# Altium footprint library WR-FPC_0.50mm.PcbLib: 147 footprints (part 5 of 10)
Each footprint in its own frame and in the unit in brackets; x right, y up, seen from the top. Pads: shape width x height; smd on the part's side, far side on the other; paste and mask are expansions set on the pad; w line width, h text height; cw(c..) or ccw(c..) is an arc to the next point about the centre after c.
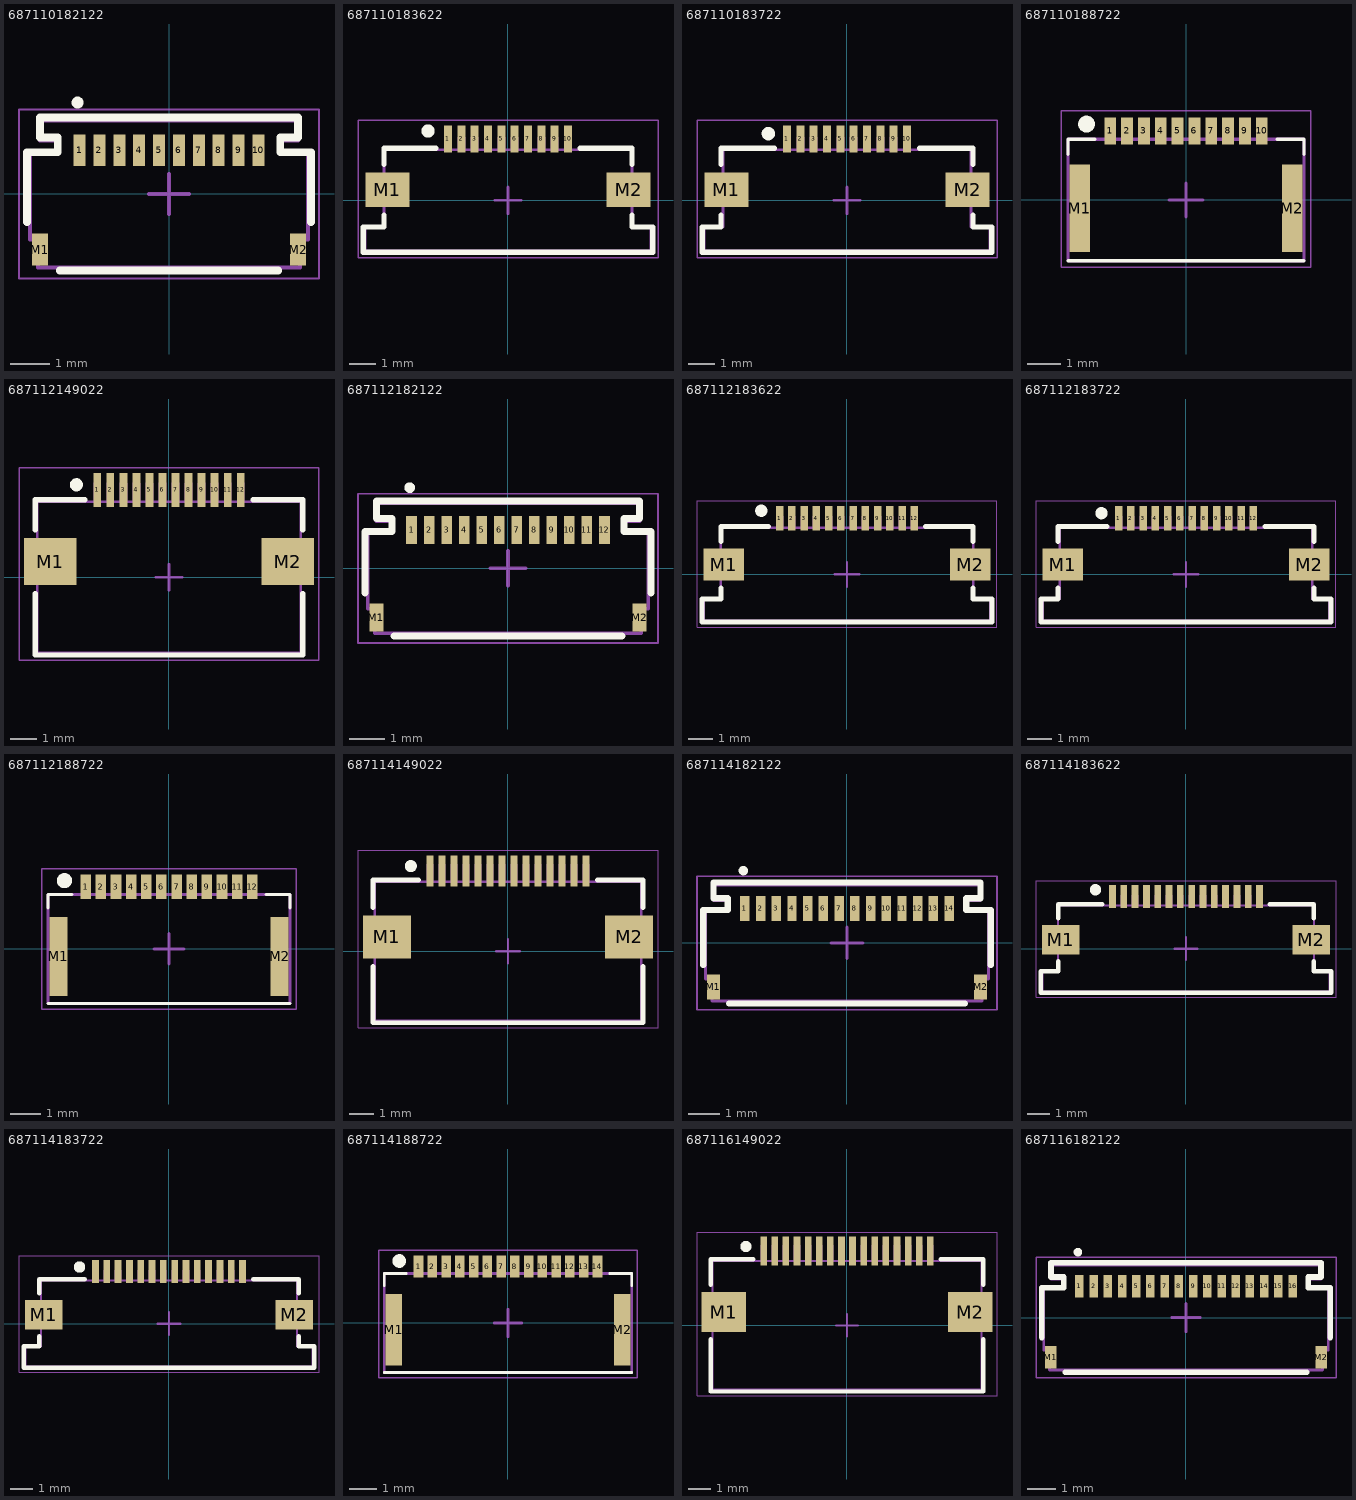
[diagram p4: the footprints below, top view; thin cyan lines are the x and y axes]

## 687110182122 [mm] "ZIF Connectors, Horizontal, Dual Contact Back Locking, pitch 0.5mm, 10p"
height 1.06
pads (12):
  rect 0.3x0.8 smd: 1(-2.25,1.1) 2(-1.75,1.1) 3(-1.25,1.1) 4(-0.75,1.1) 5(-0.25,1.1) 6(0.25,1.1) 7(0.75,1.1) 8(1.25,1.1) 9(1.75,1.1) 10(2.25,1.1)
  rect 0.4x0.8 smd: M1(-3.25,-1.4) M2(3.25,-1.4)
Top Overlay:
  circle w0.15: c-2.3,2.3 r0.075
  lines w0.2: -3.575,-0.7 -3.575,1.05 -2.8,1.05 -2.8,1.425 -3.25,1.425 -3.25,1.925 3.25,1.925 3.25,1.425 2.8,1.425 2.8,1.05 3.575,1.05 3.575,-0.7 ; -2.75,-1.925 2.75,-1.925
Top Assembly:
  lines w0.1: -3.5,-1.15 -3.3,-1.15 -3.3,-1.85 3.3,-1.85 3.3,-1.15 3.5,-1.15 3.5,1.05 2.8,1.05 2.8,1.35 3.25,1.35 3.25,1.85 -3.25,1.85 -3.25,1.35 -2.8,1.35 -2.8,1.05 -3.5,1.05 -3.5,-1.15
Top Designator:
  text ".Designator" at -3.647,-0.357 h1
Top 3D Body:
  lines w0.1: -3.5,-1.15 -3.5,1.05 -2.8,1.05 -2.8,1.35 -3.25,1.35 -3.25,1.85 3.25,1.85 3.25,1.35 2.8,1.35 2.8,1.05 3.5,1.05 3.5,-1.15 3.3,-1.15 3.3,-1.85 -3.3,-1.85 -3.3,-1.15 -3.5,-1.15
Top Courtyard:
  lines w0.05: -3.775,-2.125 3.775,-2.125 3.775,2.125 -3.775,2.125 -3.775,-2.125
Top Component Center:
  lines w0.1: -0.5,0 0.5,0 ; 0,-0.5 0,0.5
3D body "687110182122.stp": height 0.98, standoff -0.01, extent -3.5,-1.85 3.5,1.85

## 687110183622 [mm] "ZIF Connectors, Horizontal, Top Contact Low Profile, pitch 0.5mm, 10p"
height 1.3
pads (12):
  rect 0.3x1 smd: 1(-2.25,2.3) 2(-1.75,2.3) 3(-1.25,2.3) 4(-0.75,2.3) 5(-0.25,2.3) 6(0.25,2.3) 7(0.75,2.3) 8(1.25,2.3) 9(1.75,2.3) 10(2.25,2.3)
  rect 1.65x1.3 smd: M1(-4.525,0.4) M2(4.525,0.4)
Top Overlay:
  circle w0.25: c-3,2.6 r0.125
  lines w0.2: -4.65,-0.55 -4.65,-1 -5.425,-1 -5.425,-1.95 5.425,-1.95 5.425,-1 4.65,-1 4.65,-0.55 ; -4.65,1.35 -4.65,1.95 -2.7,1.95 ; 2.7,1.95 4.65,1.95 4.65,1.35
Top Assembly:
  lines w0.1: -2.35,1.9 -2.35,2.35 -2.15,2.35 -2.15,1.9 ; -1.85,1.9 -1.85,2.35 -1.65,2.35 -1.65,1.9 ; -1.35,1.9 -1.35,2.35 -1.15,2.35 -1.15,1.9 ; -0.85,1.9 -0.85,2.35 -0.65,2.35 -0.65,1.9 ; -0.35,1.9 -0.35,2.35 -0.15,2.35 -0.15,1.9 ; 0.15,1.9 0.15,2.35 0.35,2.35 0.35,1.9 ; 0.65,1.9 0.65,2.35 0.85,2.35 0.85,1.9 ; 1.15,1.9 1.15,2.35 1.35,2.35 1.35,1.9 ; 1.65,1.9 1.65,2.35 1.85,2.35 1.85,1.9 ; 2.15,1.9 2.15,2.35 2.35,2.35 2.35,1.9 ; -5.35,-1.9 -5.35,-1 -4.65,-1 -4.65,1.9 4.65,1.9 4.65,-1 5.35,-1 5.35,-1.9 -5.35,-1.9
Top Designator:
  text ".Designator" at -3.647,-0.357 h1
Top 3D Body:
  lines w0.1: -2.35,1.9 -2.35,2.35 -2.15,2.35 -2.15,1.9 ; -1.85,1.9 -1.85,2.35 -1.65,2.35 -1.65,1.9 ; -1.35,1.9 -1.35,2.35 -1.15,2.35 -1.15,1.9 ; -0.85,1.9 -0.85,2.35 -0.65,2.35 -0.65,1.9 ; -0.35,1.9 -0.35,2.35 -0.15,2.35 -0.15,1.9 ; 0.15,1.9 0.15,2.35 0.35,2.35 0.35,1.9 ; 0.65,1.9 0.65,2.35 0.85,2.35 0.85,1.9 ; 1.15,1.9 1.15,2.35 1.35,2.35 1.35,1.9 ; 1.65,1.9 1.65,2.35 1.85,2.35 1.85,1.9 ; 2.15,1.9 2.15,2.35 2.35,2.35 2.35,1.9 ; -5.35,-1.9 5.35,-1.9 5.35,-1 4.65,-1 4.65,1.9 -4.65,1.9 -4.65,-1 -5.35,-1 -5.35,-1.9
Top Courtyard:
  lines w0.05: -5.625,-2.15 -5.625,3 5.625,3 5.625,-2.15 -5.625,-2.15
Top Component Center:
  lines w0.1: -0.5,0 0.5,0 ; 0,-0.5 0,0.5
3D body "687110183622.stp": height 1.28, standoff -0.01, extent -5.35,-1.9 5.35,2.35

## 687110183722 [mm] "ZIF Connectors, Horizontal, Bottom Contact Low Profile, pitch 0.5mm, 10p"
height 1.3
pads (12):
  rect 0.3x1 smd: 1(-2.25,2.3) 2(-1.75,2.3) 3(-1.25,2.3) 4(-0.75,2.3) 5(-0.25,2.3) 6(0.25,2.3) 7(0.75,2.3) 8(1.25,2.3) 9(1.75,2.3) 10(2.25,2.3)
  rect 1.65x1.3 smd: M1(-4.525,0.4) M2(4.525,0.4)
Top Overlay:
  circle w0.25: c-2.95,2.5 r0.125
  lines w0.2: -4.725,-0.55 -4.725,-1 -5.425,-1 -5.425,-1.95 5.425,-1.95 5.425,-1 4.725,-1 4.725,-0.55 ; -4.725,1.35 -4.725,1.95 -2.725,1.95 ; 2.725,1.95 4.725,1.95 4.725,1.35
Top Assembly:
  lines w0.1: -2.35,1.9 -2.35,2.35 -2.15,2.35 -2.15,1.9 ; -1.85,1.9 -1.85,2.35 -1.65,2.35 -1.65,1.9 ; -1.35,1.9 -1.35,2.35 -1.15,2.35 -1.15,1.9 ; -0.85,1.9 -0.85,2.35 -0.65,2.35 -0.65,1.9 ; -0.35,1.9 -0.35,2.35 -0.15,2.35 -0.15,1.9 ; 0.15,1.9 0.15,2.35 0.35,2.35 0.35,1.9 ; 0.65,1.9 0.65,2.35 0.85,2.35 0.85,1.9 ; 1.15,1.9 1.15,2.35 1.35,2.35 1.35,1.9 ; 1.65,1.9 1.65,2.35 1.85,2.35 1.85,1.9 ; 2.15,1.9 2.15,2.35 2.35,2.35 2.35,1.9 ; -5.35,-1.9 -5.35,-1 -4.65,-1 -4.65,1.9 4.65,1.9 4.65,-1 5.35,-1 5.35,-1.9 -5.35,-1.9
Top Designator:
  text ".Designator" at -3.647,-0.357 h1
Top 3D Body:
  lines w0.1: -2.35,1.9 -2.35,2.35 -2.15,2.35 -2.15,1.9 ; -1.85,1.9 -1.85,2.35 -1.65,2.35 -1.65,1.9 ; -1.35,1.9 -1.35,2.35 -1.15,2.35 -1.15,1.9 ; -0.85,1.9 -0.85,2.35 -0.65,2.35 -0.65,1.9 ; -0.35,1.9 -0.35,2.35 -0.15,2.35 -0.15,1.9 ; 0.15,1.9 0.15,2.35 0.35,2.35 0.35,1.9 ; 0.65,1.9 0.65,2.35 0.85,2.35 0.85,1.9 ; 1.15,1.9 1.15,2.35 1.35,2.35 1.35,1.9 ; 1.65,1.9 1.65,2.35 1.85,2.35 1.85,1.9 ; 2.15,1.9 2.15,2.35 2.35,2.35 2.35,1.9 ; -5.35,-1.9 5.35,-1.9 5.35,-1 4.65,-1 4.65,1.9 -4.65,1.9 -4.65,-1 -5.35,-1 -5.35,-1.9
Top Courtyard:
  lines w0.05: -5.625,-2.15 -5.625,3 5.625,3 5.625,-2.15 -5.625,-2.15
Top Component Center:
  lines w0.1: -0.5,0 0.5,0 ; 0,-0.5 0,0.5
3D body "687110183722.stp": height 1.28, standoff -0.01, extent -5.35,-1.9 5.35,2.35

## 687110188722 [mm] "0.5 mm LIF Horizontal FFC Connector, 10pins"
height 1.2
pads (12):
  rect 0.35x0.8 smd: 1(-2.25,2.05) 2(-1.75,2.05) 3(-1.25,2.05) 4(-0.75,2.05) 5(-0.25,2.05) 6(0.25,2.05) 7(0.75,2.05) 8(1.25,2.05) 9(1.75,2.05) 10(2.25,2.05)
  rect 0.6x2.6 smd: M1(-3.15,-0.25) M2(3.15,-0.25)
Top Overlay:
  circle w0.25: c-2.95,2.25 r0.125
  lines w0.1: -3.5,-1.8 3.5,-1.8 ; -3.5,1.35 -3.5,1.8 -2.7,1.8 ; 2.7,1.8 3.5,1.8 3.5,1.35
Top Assembly:
  lines w0.1: -2.35,1.8 -2.35,2.3 -2.15,2.3 -2.15,1.8 ; -1.85,1.8 -1.85,2.3 -1.65,2.3 -1.65,1.8 ; -1.35,1.8 -1.35,2.3 -1.15,2.3 -1.15,1.8 ; -0.85,1.8 -0.85,2.3 -0.65,2.3 -0.65,1.8 ; -0.35,1.8 -0.35,2.3 -0.15,2.3 -0.15,1.8 ; 0.15,1.8 0.15,2.3 0.35,2.3 0.35,1.8 ; 0.65,1.8 0.65,2.3 0.85,2.3 0.85,1.8 ; 1.15,1.8 1.15,2.3 1.35,2.3 1.35,1.8 ; 1.65,1.8 1.65,2.3 1.85,2.3 1.85,1.8 ; 2.15,1.8 2.15,2.3 2.35,2.3 2.35,1.8 ; -3.5,-1.8 -3.5,1.8 3.5,1.8 3.5,-1.8 -3.5,-1.8
Top Designator:
  text ".Designator" at -3.647,-0.357 h1
Top 3D Body:
  lines w0.1: -2.35,1.8 -2.35,2.3 -2.15,2.3 -2.15,1.8 ; -1.85,1.8 -1.85,2.3 -1.65,2.3 -1.65,1.8 ; -1.35,1.8 -1.35,2.3 -1.15,2.3 -1.15,1.8 ; -0.85,1.8 -0.85,2.3 -0.65,2.3 -0.65,1.8 ; -0.35,1.8 -0.35,2.3 -0.15,2.3 -0.15,1.8 ; 0.15,1.8 0.15,2.3 0.35,2.3 0.35,1.8 ; 0.65,1.8 0.65,2.3 0.85,2.3 0.85,1.8 ; 1.15,1.8 1.15,2.3 1.35,2.3 1.35,1.8 ; 1.65,1.8 1.65,2.3 1.85,2.3 1.85,1.8 ; 2.15,1.8 2.15,2.3 2.35,2.3 2.35,1.8 ; -3.5,-1.8 3.5,-1.8 3.5,1.8 -3.5,1.8 -3.5,-1.8
Top Courtyard:
  lines w0.05: -3.7,-2 -3.7,2.65 3.7,2.65 3.7,-2 -3.7,-2
Top Component Center:
  lines w0.1: -0.5,0 0.5,0 ; 0,-0.5 0,0.5
3D body "687110188722.stp": height 1.2, standoff 0, extent -3.5,-1.8 3.5,2.3

## 687112149022 [mm] "0.50mm SMT ZIF Horizontal Hinge Type Bottom Contact, 12p"
height 2.3
pads (14):
  rect 0.3x1.3 smd: 1(-2.75,3.35) 2(-2.25,3.35) 3(-1.75,3.35) 4(-1.25,3.35) 5(-0.75,3.35) 6(-0.25,3.35) 7(0.25,3.35) 8(0.75,3.35) 9(1.25,3.35) 10(1.75,3.35) 11(2.25,3.35) 12(2.75,3.35)
  rect 2x1.8 smd: M1(-4.55,0.6) M2(4.55,0.6)
Top Overlay:
  circle w0.25: c-3.55,3.55 r0.125
  lines w0.2: -5.125,-0.625 -5.125,-2.975 5.125,-2.975 5.125,-0.625 ; -5.125,1.825 -5.125,2.975 -3.225,2.975 ; 3.225,2.975 5.125,2.975 5.125,1.825
Top Assembly:
  lines w0.1: -2.85,2.9 -2.85,3.6 -2.65,3.6 -2.65,2.9 ; -2.35,2.9 -2.35,3.6 -2.15,3.6 -2.15,2.9 ; -1.85,2.9 -1.85,3.6 -1.65,3.6 -1.65,2.9 ; -1.35,2.9 -1.35,3.6 -1.15,3.6 -1.15,2.9 ; -0.85,2.9 -0.85,3.6 -0.65,3.6 -0.65,2.9 ; -0.35,2.9 -0.35,3.6 -0.15,3.6 -0.15,2.9 ; 0.15,2.9 0.15,3.6 0.35,3.6 0.35,2.9 ; 0.65,2.9 0.65,3.6 0.85,3.6 0.85,2.9 ; 1.15,2.9 1.15,3.6 1.35,3.6 1.35,2.9 ; 1.65,2.9 1.65,3.6 1.85,3.6 1.85,2.9 ; 2.15,2.9 2.15,3.6 2.35,3.6 2.35,2.9 ; 2.65,2.9 2.65,3.6 2.85,3.6 2.85,2.9 ; -5.05,-2.9 5.05,-2.9 5.05,2.9 -5.05,2.9 -5.05,-2.9
Top Designator:
  text ".Designator" at -3.647,-0.357 h1
Top 3D Body:
  lines w0.1: -2.85,2.9 -2.85,3.6 -2.65,3.6 -2.65,2.9 ; -2.35,2.9 -2.35,3.6 -2.15,3.6 -2.15,2.9 ; -1.85,2.9 -1.85,3.6 -1.65,3.6 -1.65,2.9 ; -1.35,2.9 -1.35,3.6 -1.15,3.6 -1.15,2.9 ; -0.85,2.9 -0.85,3.6 -0.65,3.6 -0.65,2.9 ; -0.35,2.9 -0.35,3.6 -0.15,3.6 -0.15,2.9 ; 0.15,2.9 0.15,3.6 0.35,3.6 0.35,2.9 ; 0.65,2.9 0.65,3.6 0.85,3.6 0.85,2.9 ; 1.15,2.9 1.15,3.6 1.35,3.6 1.35,2.9 ; 1.65,2.9 1.65,3.6 1.85,3.6 1.85,2.9 ; 2.15,2.9 2.15,3.6 2.35,3.6 2.35,2.9 ; 2.65,2.9 2.65,3.6 2.85,3.6 2.85,2.9 ; -5.05,-2.9 -5.05,2.9 5.05,2.9 5.05,-2.9 -5.05,-2.9
Top Courtyard:
  lines w0.05: -5.75,-3.175 5.75,-3.175 5.75,4.2 -5.75,4.2 -5.75,-3.175
Top Component Center:
  lines w0.1: -0.5,0 0.5,0 ; 0,-0.5 0,0.5
3D body "687112149022.stp": height 2.25, standoff 0, extent -5.05,-2.9 5.05,3.6

## 687112182122 [mm] "ZIF Connectors, Horizontal, Dual Contact Back Locking, pitch 0.5mm, 12p"
height 1.06
pads (14):
  rect 0.3x0.8 smd: 1(-2.75,1.1) 2(-2.25,1.1) 3(-1.75,1.1) 4(-1.25,1.1) 5(-0.75,1.1) 6(-0.25,1.1) 7(0.25,1.1) 8(0.75,1.1) 9(1.25,1.1) 10(1.75,1.1) 11(2.25,1.1) 12(2.75,1.1)
  rect 0.4x0.8 smd: M1(-3.75,-1.4) M2(3.75,-1.4)
Top Overlay:
  circle w0.15: c-2.8,2.3 r0.075
  lines w0.2: -4.075,-0.7 -4.075,1.05 -3.3,1.05 -3.3,1.425 -3.75,1.425 -3.75,1.925 3.75,1.925 3.75,1.425 3.3,1.425 3.3,1.05 4.075,1.05 4.075,-0.7 ; -3.25,-1.925 3.25,-1.925
Top Assembly:
  lines w0.1: -4,-1.15 -4,1.05 -3.3,1.05 -3.3,1.35 -3.75,1.35 -3.75,1.85 3.75,1.85 3.75,1.35 3.3,1.35 3.3,1.05 4,1.05 4,-1.15 3.8,-1.15 3.8,-1.85 -3.8,-1.85 -3.8,-1.15 -4,-1.15
Top Designator:
  text ".Designator" at -3.647,-0.357 h1
Top 3D Body:
  lines w0.1: -4,-1.15 -3.8,-1.15 -3.8,-1.85 3.8,-1.85 3.8,-1.15 4,-1.15 4,1.05 3.3,1.05 3.3,1.35 3.75,1.35 3.75,1.85 -3.75,1.85 -3.75,1.35 -3.3,1.35 -3.3,1.05 -4,1.05 -4,-1.15
Top Courtyard:
  lines w0.05: -4.275,-2.125 -4.275,2.125 4.275,2.125 4.275,-2.125 -4.275,-2.125
Top Component Center:
  lines w0.1: -0.5,0 0.5,0 ; 0,-0.5 0,0.5
3D body "687112182122.stp": height 0.98, standoff -0.01, extent -4,-1.85 4,1.85

## 687112183622 [mm] "ZIF Connectors, Horizontal, Top Contact Low Profile, pitch 0.5mm, 12p"
height 1.3
pads (14):
  rect 0.3x1 smd: 1(-2.75,2.3) 2(-2.25,2.3) 3(-1.75,2.3) 4(-1.25,2.3) 5(-0.75,2.3) 6(-0.25,2.3) 7(0.25,2.3) 8(0.75,2.3) 9(1.25,2.3) 10(1.75,2.3) 11(2.25,2.3) 12(2.75,2.3)
  rect 1.65x1.3 smd: M1(-5.025,0.4) M2(5.025,0.4)
Top Overlay:
  circle w0.25: c-3.5,2.6 r0.125
  lines w0.2: -5.15,-0.55 -5.15,-1 -5.925,-1 -5.925,-1.95 5.925,-1.95 5.925,-1 5.15,-1 5.15,-0.55 ; -5.15,1.35 -5.15,1.95 -3.2,1.95 ; 3.2,1.95 5.15,1.95 5.15,1.35
Top Assembly:
  lines w0.1: -2.85,1.9 -2.85,2.35 -2.65,2.35 -2.65,1.9 ; -2.35,1.9 -2.35,2.35 -2.15,2.35 -2.15,1.9 ; -1.85,1.9 -1.85,2.35 -1.65,2.35 -1.65,1.9 ; -1.35,1.9 -1.35,2.35 -1.15,2.35 -1.15,1.9 ; -0.85,1.9 -0.85,2.35 -0.65,2.35 -0.65,1.9 ; -0.35,1.9 -0.35,2.35 -0.15,2.35 -0.15,1.9 ; 0.15,1.9 0.15,2.35 0.35,2.35 0.35,1.9 ; 0.65,1.9 0.65,2.35 0.85,2.35 0.85,1.9 ; 1.15,1.9 1.15,2.35 1.35,2.35 1.35,1.9 ; 1.65,1.9 1.65,2.35 1.85,2.35 1.85,1.9 ; 2.15,1.9 2.15,2.35 2.35,2.35 2.35,1.9 ; 2.65,1.9 2.65,2.35 2.85,2.35 2.85,1.9 ; -5.85,-1.9 -5.85,-1 -5.15,-1 -5.15,1.9 5.15,1.9 5.15,-1 5.85,-1 5.85,-1.9 -5.85,-1.9
Top Designator:
  text ".Designator" at -3.647,-0.357 h1
Top 3D Body:
  lines w0.1: -2.85,1.9 -2.85,2.35 -2.65,2.35 -2.65,1.9 ; -2.35,1.9 -2.35,2.35 -2.15,2.35 -2.15,1.9 ; -1.85,1.9 -1.85,2.35 -1.65,2.35 -1.65,1.9 ; -1.35,1.9 -1.35,2.35 -1.15,2.35 -1.15,1.9 ; -0.85,1.9 -0.85,2.35 -0.65,2.35 -0.65,1.9 ; -0.35,1.9 -0.35,2.35 -0.15,2.35 -0.15,1.9 ; 0.15,1.9 0.15,2.35 0.35,2.35 0.35,1.9 ; 0.65,1.9 0.65,2.35 0.85,2.35 0.85,1.9 ; 1.15,1.9 1.15,2.35 1.35,2.35 1.35,1.9 ; 1.65,1.9 1.65,2.35 1.85,2.35 1.85,1.9 ; 2.15,1.9 2.15,2.35 2.35,2.35 2.35,1.9 ; 2.65,1.9 2.65,2.35 2.85,2.35 2.85,1.9 ; -5.85,-1.9 5.85,-1.9 5.85,-1 5.15,-1 5.15,1.9 -5.15,1.9 -5.15,-1 -5.85,-1 -5.85,-1.9
Top Courtyard:
  lines w0.05: -6.125,-2.15 -6.125,3 6.125,3 6.125,-2.15 -6.125,-2.15
Top Component Center:
  lines w0.1: -0.5,0 0.5,0 ; 0,-0.5 0,0.5
3D body "687112183622.stp": height 1.28, standoff -0.01, extent -5.85,-1.9 5.85,2.35

## 687112183722 [mm] "ZIF Connectors, Horizontal, Bottom Contact Low Profile, pitch 0.5mm, 12p"
height 1.3
pads (14):
  rect 0.3x1 smd: 1(-2.75,2.3) 2(-2.25,2.3) 3(-1.75,2.3) 4(-1.25,2.3) 5(-0.75,2.3) 6(-0.25,2.3) 7(0.25,2.3) 8(0.75,2.3) 9(1.25,2.3) 10(1.75,2.3) 11(2.25,2.3) 12(2.75,2.3)
  rect 1.65x1.3 smd: M1(-5.025,0.4) M2(5.025,0.4)
Top Overlay:
  circle w0.25: c-3.45,2.5 r0.125
  lines w0.2: -5.225,-0.55 -5.225,-1 -5.925,-1 -5.925,-1.95 5.925,-1.95 5.925,-1 5.225,-1 5.225,-0.55 ; -5.225,1.35 -5.225,1.95 -3.225,1.95 ; 3.225,1.95 5.225,1.95 5.225,1.35
Top Assembly:
  lines w0.1: -2.85,1.9 -2.85,2.35 -2.65,2.35 -2.65,1.9 ; -2.35,1.9 -2.35,2.35 -2.15,2.35 -2.15,1.9 ; -1.85,1.9 -1.85,2.35 -1.65,2.35 -1.65,1.9 ; -1.35,1.9 -1.35,2.35 -1.15,2.35 -1.15,1.9 ; -0.85,1.9 -0.85,2.35 -0.65,2.35 -0.65,1.9 ; -0.35,1.9 -0.35,2.35 -0.15,2.35 -0.15,1.9 ; 0.15,1.9 0.15,2.35 0.35,2.35 0.35,1.9 ; 0.65,1.9 0.65,2.35 0.85,2.35 0.85,1.9 ; 1.15,1.9 1.15,2.35 1.35,2.35 1.35,1.9 ; 1.65,1.9 1.65,2.35 1.85,2.35 1.85,1.9 ; 2.15,1.9 2.15,2.35 2.35,2.35 2.35,1.9 ; 2.65,1.9 2.65,2.35 2.85,2.35 2.85,1.9 ; -5.85,-1.9 5.85,-1.9 5.85,-1 5.15,-1 5.15,1.9 -5.15,1.9 -5.15,-1 -5.85,-1 -5.85,-1.9
Top Designator:
  text ".Designator" at -3.647,-0.357 h1
Top 3D Body:
  lines w0.1: -2.85,1.9 -2.85,2.35 -2.65,2.35 -2.65,1.9 ; -2.35,1.9 -2.35,2.35 -2.15,2.35 -2.15,1.9 ; -1.85,1.9 -1.85,2.35 -1.65,2.35 -1.65,1.9 ; -1.35,1.9 -1.35,2.35 -1.15,2.35 -1.15,1.9 ; -0.85,1.9 -0.85,2.35 -0.65,2.35 -0.65,1.9 ; -0.35,1.9 -0.35,2.35 -0.15,2.35 -0.15,1.9 ; 0.15,1.9 0.15,2.35 0.35,2.35 0.35,1.9 ; 0.65,1.9 0.65,2.35 0.85,2.35 0.85,1.9 ; 1.15,1.9 1.15,2.35 1.35,2.35 1.35,1.9 ; 1.65,1.9 1.65,2.35 1.85,2.35 1.85,1.9 ; 2.15,1.9 2.15,2.35 2.35,2.35 2.35,1.9 ; 2.65,1.9 2.65,2.35 2.85,2.35 2.85,1.9 ; -5.85,-1.9 -5.85,-1 -5.15,-1 -5.15,1.9 5.15,1.9 5.15,-1 5.85,-1 5.85,-1.9 -5.85,-1.9
Top Courtyard:
  lines w0.05: -6.125,-2.15 6.125,-2.15 6.125,3 -6.125,3 -6.125,-2.15
Top Component Center:
  lines w0.1: -0.5,0 0.5,0 ; 0,-0.5 0,0.5
3D body "687112183722.stp": height 1.28, standoff -0.01, extent -5.85,-1.9 5.85,2.35

## 687112188722 [mm] "0.5 mm LIF Horizontal FFC Connector, 12pins"
height 1.2
pads (14):
  rect 0.35x0.8 smd: 1(-2.75,2.05) 2(-2.25,2.05) 3(-1.75,2.05) 4(-1.25,2.05) 5(-0.75,2.05) 6(-0.25,2.05) 7(0.25,2.05) 8(0.75,2.05) 9(1.25,2.05) 10(1.75,2.05) 11(2.25,2.05) 12(2.75,2.05)
  rect 0.6x2.6 smd: M1(-3.65,-0.25) M2(3.65,-0.25)
Top Overlay:
  circle w0.25: c-3.45,2.25 r0.125
  lines w0.1: -4,-1.8 4,-1.8 ; -4,1.35 -4,1.8 -3.2,1.8 ; 3.2,1.8 4,1.8 4,1.35
Top Assembly:
  lines w0.1: -2.85,1.8 -2.85,2.3 -2.65,2.3 -2.65,1.8 ; -2.35,1.8 -2.35,2.3 -2.15,2.3 -2.15,1.8 ; -1.85,1.8 -1.85,2.3 -1.65,2.3 -1.65,1.8 ; -1.35,1.8 -1.35,2.3 -1.15,2.3 -1.15,1.8 ; -0.85,1.8 -0.85,2.3 -0.65,2.3 -0.65,1.8 ; -0.35,1.8 -0.35,2.3 -0.15,2.3 -0.15,1.8 ; 0.15,1.8 0.15,2.3 0.35,2.3 0.35,1.8 ; 0.65,1.8 0.65,2.3 0.85,2.3 0.85,1.8 ; 1.15,1.8 1.15,2.3 1.35,2.3 1.35,1.8 ; 1.65,1.8 1.65,2.3 1.85,2.3 1.85,1.8 ; 2.15,1.8 2.15,2.3 2.35,2.3 2.35,1.8 ; 2.65,1.8 2.65,2.3 2.85,2.3 2.85,1.8 ; -4,-1.8 -4,1.8 4,1.8 4,-1.8 -4,-1.8
Top Designator:
  text ".Designator" at -3.647,-0.357 h1
Top 3D Body:
  lines w0.1: -2.85,1.8 -2.85,2.3 -2.65,2.3 -2.65,1.8 ; -2.35,1.8 -2.35,2.3 -2.15,2.3 -2.15,1.8 ; -1.85,1.8 -1.85,2.3 -1.65,2.3 -1.65,1.8 ; -1.35,1.8 -1.35,2.3 -1.15,2.3 -1.15,1.8 ; -0.85,1.8 -0.85,2.3 -0.65,2.3 -0.65,1.8 ; -0.35,1.8 -0.35,2.3 -0.15,2.3 -0.15,1.8 ; 0.15,1.8 0.15,2.3 0.35,2.3 0.35,1.8 ; 0.65,1.8 0.65,2.3 0.85,2.3 0.85,1.8 ; 1.15,1.8 1.15,2.3 1.35,2.3 1.35,1.8 ; 1.65,1.8 1.65,2.3 1.85,2.3 1.85,1.8 ; 2.15,1.8 2.15,2.3 2.35,2.3 2.35,1.8 ; 2.65,1.8 2.65,2.3 2.85,2.3 2.85,1.8 ; -4,-1.8 4,-1.8 4,1.8 -4,1.8 -4,-1.8
Top Courtyard:
  lines w0.05: -4.2,-2 -4.2,2.65 4.2,2.65 4.2,-2 -4.2,-2
Top Component Center:
  lines w0.1: -0.5,0 0.5,0 ; 0,-0.5 0,0.5
3D body "687112188722.stp": height 1.2, standoff 0, extent -4,-1.8 4,2.3

## 687114149022 [mm] "0.50mm SMT ZIF Horizontal Hinge Type Bottom Contact, 14p"
height 2.3
pads (16):
  rect 0.3x1.3 smd: 1(-3.25,3.35) 2(-2.75,3.35) 3(-2.25,3.35) 4(-1.75,3.35) 5(-1.25,3.35) 6(-0.75,3.35) 7(-0.25,3.35) 8(0.25,3.35) 9(0.75,3.35) 10(1.25,3.35) 11(1.75,3.35) 12(2.25,3.35) 13(2.75,3.35) 14(3.25,3.35)
  rect 2x1.8 smd: M1(-5.05,0.6) M2(5.05,0.6)
Top Overlay:
  circle w0.25: c-4.05,3.55 r0.125
  lines w0.2: -5.625,-0.625 -5.625,-2.975 5.625,-2.975 5.625,-0.625 ; -5.625,1.825 -5.625,2.975 -3.725,2.975 ; 3.725,2.975 5.625,2.975 5.625,1.825
Top Assembly:
  lines w0.1: -3.35,2.9 -3.35,3.6 -3.15,3.6 -3.15,2.9 ; -2.85,2.9 -2.85,3.6 -2.65,3.6 -2.65,2.9 ; -2.35,2.9 -2.35,3.6 -2.15,3.6 -2.15,2.9 ; -1.85,2.9 -1.85,3.6 -1.65,3.6 -1.65,2.9 ; -1.35,2.9 -1.35,3.6 -1.15,3.6 -1.15,2.9 ; -0.85,2.9 -0.85,3.6 -0.65,3.6 -0.65,2.9 ; -0.35,2.9 -0.35,3.6 -0.15,3.6 -0.15,2.9 ; 0.15,2.9 0.15,3.6 0.35,3.6 0.35,2.9 ; 0.65,2.9 0.65,3.6 0.85,3.6 0.85,2.9 ; 1.15,2.9 1.15,3.6 1.35,3.6 1.35,2.9 ; 1.65,2.9 1.65,3.6 1.85,3.6 1.85,2.9 ; 2.15,2.9 2.15,3.6 2.35,3.6 2.35,2.9 ; 2.65,2.9 2.65,3.6 2.85,3.6 2.85,2.9 ; 3.15,2.9 3.15,3.6 3.35,3.6 3.35,2.9 ; -5.55,-2.9 -5.55,2.9 5.55,2.9 5.55,-2.9 -5.55,-2.9
Top Designator:
  text ".Designator" at -3.647,-0.357 h1
Top 3D Body:
  lines w0.1: -3.35,2.9 -3.35,3.6 -3.15,3.6 -3.15,2.9 ; -2.85,2.9 -2.85,3.6 -2.65,3.6 -2.65,2.9 ; -2.35,2.9 -2.35,3.6 -2.15,3.6 -2.15,2.9 ; -1.85,2.9 -1.85,3.6 -1.65,3.6 -1.65,2.9 ; -1.35,2.9 -1.35,3.6 -1.15,3.6 -1.15,2.9 ; -0.85,2.9 -0.85,3.6 -0.65,3.6 -0.65,2.9 ; -0.35,2.9 -0.35,3.6 -0.15,3.6 -0.15,2.9 ; 0.15,2.9 0.15,3.6 0.35,3.6 0.35,2.9 ; 0.65,2.9 0.65,3.6 0.85,3.6 0.85,2.9 ; 1.15,2.9 1.15,3.6 1.35,3.6 1.35,2.9 ; 1.65,2.9 1.65,3.6 1.85,3.6 1.85,2.9 ; 2.15,2.9 2.15,3.6 2.35,3.6 2.35,2.9 ; 2.65,2.9 2.65,3.6 2.85,3.6 2.85,2.9 ; 3.15,2.9 3.15,3.6 3.35,3.6 3.35,2.9 ; -5.55,-2.9 5.55,-2.9 5.55,2.9 -5.55,2.9 -5.55,-2.9
Top Courtyard:
  lines w0.05: -6.25,-3.175 -6.25,4.2 6.25,4.2 6.25,-3.175 -6.25,-3.175
Top Component Center:
  lines w0.1: -0.5,0 0.5,0 ; 0,-0.5 0,0.5
3D body "687114149022.stp": height 2.25, standoff 0, extent -5.55,-2.9 5.55,3.6

## 687114182122 [mm] "ZIF Connectors, Horizontal, Dual Contact Back Locking, pitch 0.5mm, 14p"
height 1.06
pads (16):
  rect 0.3x0.8 smd: 1(-3.25,1.1) 2(-2.75,1.1) 3(-2.25,1.1) 4(-1.75,1.1) 5(-1.25,1.1) 6(-0.75,1.1) 7(-0.25,1.1) 8(0.25,1.1) 9(0.75,1.1) 10(1.25,1.1) 11(1.75,1.1) 12(2.25,1.1) 13(2.75,1.1) 14(3.25,1.1)
  rect 0.4x0.8 smd: M1(-4.25,-1.4) M2(4.25,-1.4)
Top Overlay:
  circle w0.15: c-3.3,2.3 r0.075
  lines w0.2: -4.575,-0.7 -4.575,1.05 -3.8,1.05 -3.8,1.425 -4.25,1.425 -4.25,1.925 4.25,1.925 4.25,1.425 3.8,1.425 3.8,1.05 4.575,1.05 4.575,-0.7 ; -3.75,-1.925 3.75,-1.925
Top Assembly:
  lines w0.1: -4.5,-1.15 -4.5,1.05 -3.8,1.05 -3.8,1.35 -4.25,1.35 -4.25,1.85 4.25,1.85 4.25,1.35 3.8,1.35 3.8,1.05 4.5,1.05 4.5,-1.15 4.3,-1.15 4.3,-1.85 -4.3,-1.85 -4.3,-1.15 -4.5,-1.15
Top Designator:
  text ".Designator" at -3.647,-0.357 h1
Top 3D Body:
  lines w0.1: -4.5,-1.15 -4.3,-1.15 -4.3,-1.85 4.3,-1.85 4.3,-1.15 4.5,-1.15 4.5,1.05 3.8,1.05 3.8,1.35 4.25,1.35 4.25,1.85 -4.25,1.85 -4.25,1.35 -3.8,1.35 -3.8,1.05 -4.5,1.05 -4.5,-1.15
Top Courtyard:
  lines w0.05: -4.775,-2.125 -4.775,2.125 4.775,2.125 4.775,-2.125 -4.775,-2.125
Top Component Center:
  lines w0.1: -0.5,0 0.5,0 ; 0,-0.5 0,0.5
3D body "687114182122.stp": height 0.98, standoff -0.01, extent -4.5,-1.85 4.5,1.85

## 687114183622 [mm] "ZIF Connectors, Horizontal, Top Contact Low Profile, pitch 0.5mm, 14p"
height 1.3
pads (16):
  rect 0.3x1 smd: 1(-3.25,2.3) 2(-2.75,2.3) 3(-2.25,2.3) 4(-1.75,2.3) 5(-1.25,2.3) 6(-0.75,2.3) 7(-0.25,2.3) 8(0.25,2.3) 9(0.75,2.3) 10(1.25,2.3) 11(1.75,2.3) 12(2.25,2.3) 13(2.75,2.3) 14(3.25,2.3)
  rect 1.65x1.3 smd: M1(-5.525,0.4) M2(5.525,0.4)
Top Overlay:
  circle w0.25: c-4,2.6 r0.125
  lines w0.2: -5.65,-0.55 -5.65,-1 -6.425,-1 -6.425,-1.95 6.425,-1.95 6.425,-1 5.65,-1 5.65,-0.55 ; -5.65,1.35 -5.65,1.95 -3.7,1.95 ; 3.7,1.95 5.65,1.95 5.65,1.35
Top Assembly:
  lines w0.1: -3.35,1.9 -3.35,2.35 -3.15,2.35 -3.15,1.9 ; -2.85,1.9 -2.85,2.35 -2.65,2.35 -2.65,1.9 ; -2.35,1.9 -2.35,2.35 -2.15,2.35 -2.15,1.9 ; -1.85,1.9 -1.85,2.35 -1.65,2.35 -1.65,1.9 ; -1.35,1.9 -1.35,2.35 -1.15,2.35 -1.15,1.9 ; -0.85,1.9 -0.85,2.35 -0.65,2.35 -0.65,1.9 ; -0.35,1.9 -0.35,2.35 -0.15,2.35 -0.15,1.9 ; 0.15,1.9 0.15,2.35 0.35,2.35 0.35,1.9 ; 0.65,1.9 0.65,2.35 0.85,2.35 0.85,1.9 ; 1.15,1.9 1.15,2.35 1.35,2.35 1.35,1.9 ; 1.65,1.9 1.65,2.35 1.85,2.35 1.85,1.9 ; 2.15,1.9 2.15,2.35 2.35,2.35 2.35,1.9 ; 2.65,1.9 2.65,2.35 2.85,2.35 2.85,1.9 ; 3.15,1.9 3.15,2.35 3.35,2.35 3.35,1.9 ; -6.35,-1.9 6.35,-1.9 6.35,-1 5.65,-1 5.65,1.9 -5.65,1.9 -5.65,-1 -6.35,-1 -6.35,-1.9
Top Designator:
  text ".Designator" at -3.647,-0.357 h1
Top 3D Body:
  lines w0.1: -3.35,1.9 -3.35,2.35 -3.15,2.35 -3.15,1.9 ; -2.85,1.9 -2.85,2.35 -2.65,2.35 -2.65,1.9 ; -2.35,1.9 -2.35,2.35 -2.15,2.35 -2.15,1.9 ; -1.85,1.9 -1.85,2.35 -1.65,2.35 -1.65,1.9 ; -1.35,1.9 -1.35,2.35 -1.15,2.35 -1.15,1.9 ; -0.85,1.9 -0.85,2.35 -0.65,2.35 -0.65,1.9 ; -0.35,1.9 -0.35,2.35 -0.15,2.35 -0.15,1.9 ; 0.15,1.9 0.15,2.35 0.35,2.35 0.35,1.9 ; 0.65,1.9 0.65,2.35 0.85,2.35 0.85,1.9 ; 1.15,1.9 1.15,2.35 1.35,2.35 1.35,1.9 ; 1.65,1.9 1.65,2.35 1.85,2.35 1.85,1.9 ; 2.15,1.9 2.15,2.35 2.35,2.35 2.35,1.9 ; 2.65,1.9 2.65,2.35 2.85,2.35 2.85,1.9 ; 3.15,1.9 3.15,2.35 3.35,2.35 3.35,1.9 ; -6.35,-1.9 -6.35,-1 -5.65,-1 -5.65,1.9 5.65,1.9 5.65,-1 6.35,-1 6.35,-1.9 -6.35,-1.9
Top Courtyard:
  lines w0.05: -6.625,-2.15 6.625,-2.15 6.625,3 -6.625,3 -6.625,-2.15
Top Component Center:
  lines w0.1: -0.5,0 0.5,0 ; 0,-0.5 0,0.5
3D body "687114183622.stp": height 1.28, standoff -0.01, extent -6.35,-1.9 6.35,2.35

## 687114183722 [mm] "ZIF Connectors, Horizontal, Bottom Contact Low Profile, pitch 0.5mm, 14p"
height 1.3
pads (16):
  rect 0.3x1 smd: 1(-3.25,2.3) 2(-2.75,2.3) 3(-2.25,2.3) 4(-1.75,2.3) 5(-1.25,2.3) 6(-0.75,2.3) 7(-0.25,2.3) 8(0.25,2.3) 9(0.75,2.3) 10(1.25,2.3) 11(1.75,2.3) 12(2.25,2.3) 13(2.75,2.3) 14(3.25,2.3)
  rect 1.65x1.3 smd: M1(-5.525,0.4) M2(5.525,0.4)
Top Overlay:
  circle w0.25: c-3.95,2.5 r0.125
  lines w0.2: -5.725,-0.55 -5.725,-1 -6.425,-1 -6.425,-1.95 6.425,-1.95 6.425,-1 5.725,-1 5.725,-0.55 ; -5.725,1.35 -5.725,1.95 -3.725,1.95 ; 3.725,1.95 5.725,1.95 5.725,1.35
Top Assembly:
  lines w0.1: -3.35,1.9 -3.35,2.35 -3.15,2.35 -3.15,1.9 ; -2.85,1.9 -2.85,2.35 -2.65,2.35 -2.65,1.9 ; -2.35,1.9 -2.35,2.35 -2.15,2.35 -2.15,1.9 ; -1.85,1.9 -1.85,2.35 -1.65,2.35 -1.65,1.9 ; -1.35,1.9 -1.35,2.35 -1.15,2.35 -1.15,1.9 ; -0.85,1.9 -0.85,2.35 -0.65,2.35 -0.65,1.9 ; -0.35,1.9 -0.35,2.35 -0.15,2.35 -0.15,1.9 ; 0.15,1.9 0.15,2.35 0.35,2.35 0.35,1.9 ; 0.65,1.9 0.65,2.35 0.85,2.35 0.85,1.9 ; 1.15,1.9 1.15,2.35 1.35,2.35 1.35,1.9 ; 1.65,1.9 1.65,2.35 1.85,2.35 1.85,1.9 ; 2.15,1.9 2.15,2.35 2.35,2.35 2.35,1.9 ; 2.65,1.9 2.65,2.35 2.85,2.35 2.85,1.9 ; 3.15,1.9 3.15,2.35 3.35,2.35 3.35,1.9 ; -6.35,-1.9 6.35,-1.9 6.35,-1 5.65,-1 5.65,1.9 -5.65,1.9 -5.65,-1 -6.35,-1 -6.35,-1.9
Top Designator:
  text ".Designator" at -3.647,-0.357 h1
Top 3D Body:
  lines w0.1: -3.35,1.9 -3.35,2.35 -3.15,2.35 -3.15,1.9 ; -2.85,1.9 -2.85,2.35 -2.65,2.35 -2.65,1.9 ; -2.35,1.9 -2.35,2.35 -2.15,2.35 -2.15,1.9 ; -1.85,1.9 -1.85,2.35 -1.65,2.35 -1.65,1.9 ; -1.35,1.9 -1.35,2.35 -1.15,2.35 -1.15,1.9 ; -0.85,1.9 -0.85,2.35 -0.65,2.35 -0.65,1.9 ; -0.35,1.9 -0.35,2.35 -0.15,2.35 -0.15,1.9 ; 0.15,1.9 0.15,2.35 0.35,2.35 0.35,1.9 ; 0.65,1.9 0.65,2.35 0.85,2.35 0.85,1.9 ; 1.15,1.9 1.15,2.35 1.35,2.35 1.35,1.9 ; 1.65,1.9 1.65,2.35 1.85,2.35 1.85,1.9 ; 2.15,1.9 2.15,2.35 2.35,2.35 2.35,1.9 ; 2.65,1.9 2.65,2.35 2.85,2.35 2.85,1.9 ; 3.15,1.9 3.15,2.35 3.35,2.35 3.35,1.9 ; -6.35,-1.9 -6.35,-1 -5.65,-1 -5.65,1.9 5.65,1.9 5.65,-1 6.35,-1 6.35,-1.9 -6.35,-1.9
Top Courtyard:
  lines w0.05: -6.625,-2.15 6.625,-2.15 6.625,3 -6.625,3 -6.625,-2.15
Top Component Center:
  lines w0.1: -0.5,0 0.5,0 ; 0,-0.5 0,0.5
3D body "687114183722.stp": height 1.28, standoff -0.01, extent -6.35,-1.9 6.35,2.35

## 687114188722 [mm] "0.5 mm LIF Horizontal FFC Connector, 14pins"
height 1.2
pads (16):
  rect 0.35x0.8 smd: 1(-3.25,2.05) 2(-2.75,2.05) 3(-2.25,2.05) 4(-1.75,2.05) 5(-1.25,2.05) 6(-0.75,2.05) 7(-0.25,2.05) 8(0.25,2.05) 9(0.75,2.05) 10(1.25,2.05) 11(1.75,2.05) 12(2.25,2.05) 13(2.75,2.05) 14(3.25,2.05)
  rect 0.6x2.6 smd: M1(-4.15,-0.25) M2(4.15,-0.25)
Top Overlay:
  circle w0.25: c-3.95,2.25 r0.125
  lines w0.1: -4.5,-1.8 4.5,-1.8 ; -4.5,1.35 -4.5,1.8 -3.7,1.8 ; 3.7,1.8 4.5,1.8 4.5,1.35
Top Assembly:
  lines w0.1: -3.35,1.8 -3.35,2.3 -3.15,2.3 -3.15,1.8 ; -2.85,1.8 -2.85,2.3 -2.65,2.3 -2.65,1.8 ; -2.35,1.8 -2.35,2.3 -2.15,2.3 -2.15,1.8 ; -1.85,1.8 -1.85,2.3 -1.65,2.3 -1.65,1.8 ; -1.35,1.8 -1.35,2.3 -1.15,2.3 -1.15,1.8 ; -0.85,1.8 -0.85,2.3 -0.65,2.3 -0.65,1.8 ; -0.35,1.8 -0.35,2.3 -0.15,2.3 -0.15,1.8 ; 0.15,1.8 0.15,2.3 0.35,2.3 0.35,1.8 ; 0.65,1.8 0.65,2.3 0.85,2.3 0.85,1.8 ; 1.15,1.8 1.15,2.3 1.35,2.3 1.35,1.8 ; 1.65,1.8 1.65,2.3 1.85,2.3 1.85,1.8 ; 2.15,1.8 2.15,2.3 2.35,2.3 2.35,1.8 ; 2.65,1.8 2.65,2.3 2.85,2.3 2.85,1.8 ; 3.15,1.8 3.15,2.3 3.35,2.3 3.35,1.8 ; -4.5,-1.8 -4.5,1.8 4.5,1.8 4.5,-1.8 -4.5,-1.8
Top Designator:
  text ".Designator" at -3.647,-0.357 h1
Top 3D Body:
  lines w0.1: -3.35,1.8 -3.35,2.3 -3.15,2.3 -3.15,1.8 ; -2.85,1.8 -2.85,2.3 -2.65,2.3 -2.65,1.8 ; -2.35,1.8 -2.35,2.3 -2.15,2.3 -2.15,1.8 ; -1.85,1.8 -1.85,2.3 -1.65,2.3 -1.65,1.8 ; -1.35,1.8 -1.35,2.3 -1.15,2.3 -1.15,1.8 ; -0.85,1.8 -0.85,2.3 -0.65,2.3 -0.65,1.8 ; -0.35,1.8 -0.35,2.3 -0.15,2.3 -0.15,1.8 ; 0.15,1.8 0.15,2.3 0.35,2.3 0.35,1.8 ; 0.65,1.8 0.65,2.3 0.85,2.3 0.85,1.8 ; 1.15,1.8 1.15,2.3 1.35,2.3 1.35,1.8 ; 1.65,1.8 1.65,2.3 1.85,2.3 1.85,1.8 ; 2.15,1.8 2.15,2.3 2.35,2.3 2.35,1.8 ; 2.65,1.8 2.65,2.3 2.85,2.3 2.85,1.8 ; 3.15,1.8 3.15,2.3 3.35,2.3 3.35,1.8 ; -4.5,-1.8 4.5,-1.8 4.5,1.8 -4.5,1.8 -4.5,-1.8
Top Courtyard:
  lines w0.05: -4.7,-2 -4.7,2.65 4.7,2.65 4.7,-2 -4.7,-2
Top Component Center:
  lines w0.1: -0.5,0 0.5,0 ; 0,-0.5 0,0.5
3D body "687114188722.stp": height 1.2, standoff 0, extent -4.5,-1.8 4.5,2.3

## 687116149022 [mm] "0.50mm SMT ZIF Horizontal Hinge Type Bottom Contact, 16p"
height 2.3
pads (18):
  rect 0.3x1.3 smd: 1(-3.75,3.35) 2(-3.25,3.35) 3(-2.75,3.35) 4(-2.25,3.35) 5(-1.75,3.35) 6(-1.25,3.35) 7(-0.75,3.35) 8(-0.25,3.35) 9(0.25,3.35) 10(0.75,3.35) 11(1.25,3.35) 12(1.75,3.35) 13(2.25,3.35) 14(2.75,3.35) 15(3.25,3.35) 16(3.75,3.35)
  rect 2x1.8 smd: M1(-5.55,0.6) M2(5.55,0.6)
Top Overlay:
  circle w0.25: c-4.55,3.55 r0.125
  lines w0.2: -6.125,-0.625 -6.125,-2.975 6.125,-2.975 6.125,-0.625 ; -6.125,1.825 -6.125,2.975 -4.225,2.975 ; 4.225,2.975 6.125,2.975 6.125,1.825
Top Assembly:
  lines w0.1: -3.85,2.9 -3.85,3.6 -3.65,3.6 -3.65,2.9 ; -3.35,2.9 -3.35,3.6 -3.15,3.6 -3.15,2.9 ; -2.85,2.9 -2.85,3.6 -2.65,3.6 -2.65,2.9 ; -2.35,2.9 -2.35,3.6 -2.15,3.6 -2.15,2.9 ; -1.85,2.9 -1.85,3.6 -1.65,3.6 -1.65,2.9 ; -1.35,2.9 -1.35,3.6 -1.15,3.6 -1.15,2.9 ; -0.85,2.9 -0.85,3.6 -0.65,3.6 -0.65,2.9 ; -0.35,2.9 -0.35,3.6 -0.15,3.6 -0.15,2.9 ; 0.15,2.9 0.15,3.6 0.35,3.6 0.35,2.9 ; 0.65,2.9 0.65,3.6 0.85,3.6 0.85,2.9 ; 1.15,2.9 1.15,3.6 1.35,3.6 1.35,2.9 ; 1.65,2.9 1.65,3.6 1.85,3.6 1.85,2.9 ; 2.15,2.9 2.15,3.6 2.35,3.6 2.35,2.9 ; 2.65,2.9 2.65,3.6 2.85,3.6 2.85,2.9 ; 3.15,2.9 3.15,3.6 3.35,3.6 3.35,2.9 ; 3.65,2.9 3.65,3.6 3.85,3.6 3.85,2.9 ; -6.05,-2.9 6.05,-2.9 6.05,2.9 -6.05,2.9 -6.05,-2.9
Top Designator:
  text ".Designator" at -3.647,-0.357 h1
Top 3D Body:
  lines w0.1: -3.85,2.9 -3.85,3.6 -3.65,3.6 -3.65,2.9 ; -3.35,2.9 -3.35,3.6 -3.15,3.6 -3.15,2.9 ; -2.85,2.9 -2.85,3.6 -2.65,3.6 -2.65,2.9 ; -2.35,2.9 -2.35,3.6 -2.15,3.6 -2.15,2.9 ; -1.85,2.9 -1.85,3.6 -1.65,3.6 -1.65,2.9 ; -1.35,2.9 -1.35,3.6 -1.15,3.6 -1.15,2.9 ; -0.85,2.9 -0.85,3.6 -0.65,3.6 -0.65,2.9 ; -0.35,2.9 -0.35,3.6 -0.15,3.6 -0.15,2.9 ; 0.15,2.9 0.15,3.6 0.35,3.6 0.35,2.9 ; 0.65,2.9 0.65,3.6 0.85,3.6 0.85,2.9 ; 1.15,2.9 1.15,3.6 1.35,3.6 1.35,2.9 ; 1.65,2.9 1.65,3.6 1.85,3.6 1.85,2.9 ; 2.15,2.9 2.15,3.6 2.35,3.6 2.35,2.9 ; 2.65,2.9 2.65,3.6 2.85,3.6 2.85,2.9 ; 3.15,2.9 3.15,3.6 3.35,3.6 3.35,2.9 ; 3.65,2.9 3.65,3.6 3.85,3.6 3.85,2.9 ; -6.05,-2.9 -6.05,2.9 6.05,2.9 6.05,-2.9 -6.05,-2.9
Top Courtyard:
  lines w0.05: -6.75,-3.175 6.75,-3.175 6.75,4.2 -6.75,4.2 -6.75,-3.175
Top Component Center:
  lines w0.1: -0.5,0 0.5,0 ; 0,-0.5 0,0.5
3D body "687116149022.stp": height 2.25, standoff 0, extent -6.05,-2.9 6.05,3.6

## 687116182122 [mm] "ZIF Connectors, Horizontal, Dual Contact Back Locking, pitch 0.5mm, 16p"
height 1.06
pads (18):
  rect 0.3x0.8 smd: 1(-3.75,1.1) 2(-3.25,1.1) 3(-2.75,1.1) 4(-2.25,1.1) 5(-1.75,1.1) 6(-1.25,1.1) 7(-0.75,1.1) 8(-0.25,1.1) 9(0.25,1.1) 10(0.75,1.1) 11(1.25,1.1) 12(1.75,1.1) 13(2.25,1.1) 14(2.75,1.1) 15(3.25,1.1) 16(3.75,1.1)
  rect 0.4x0.8 smd: M1(-4.75,-1.4) M2(4.75,-1.4)
Top Overlay:
  circle w0.15: c-3.8,2.3 r0.075
  lines w0.2: -5.075,-0.7 -5.075,1.05 -4.3,1.05 -4.3,1.425 -4.75,1.425 -4.75,1.925 4.75,1.925 4.75,1.425 4.3,1.425 4.3,1.05 5.075,1.05 5.075,-0.7 ; -4.25,-1.925 4.25,-1.925
Top Assembly:
  lines w0.1: -5,-1.15 -4.8,-1.15 -4.8,-1.85 4.8,-1.85 4.8,-1.15 5,-1.15 5,1.05 4.3,1.05 4.3,1.35 4.75,1.35 4.75,1.85 -4.75,1.85 -4.75,1.35 -4.3,1.35 -4.3,1.05 -5,1.05 -5,-1.15
Top Designator:
  text ".Designator" at -3.647,-0.357 h1
Top 3D Body:
  lines w0.1: -5,-1.15 -5,1.05 -4.3,1.05 -4.3,1.35 -4.75,1.35 -4.75,1.85 4.75,1.85 4.75,1.35 4.3,1.35 4.3,1.05 5,1.05 5,-1.15 4.8,-1.15 4.8,-1.85 -4.8,-1.85 -4.8,-1.15 -5,-1.15
Top Courtyard:
  lines w0.05: -5.275,-2.125 5.275,-2.125 5.275,2.125 -5.275,2.125 -5.275,-2.125
Top Component Center:
  lines w0.1: -0.5,0 0.5,0 ; 0,-0.5 0,0.5
3D body "687116182122.stp": height 0.98, standoff -0.01, extent -5,-1.85 5,1.85